# Altium schematic symbol library HMC784AMS8GE.SchLib: 1 symbol
Pins are listed as number, name and electrical type; pins without a type are passive.

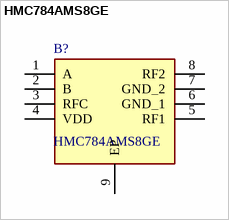
[diagram p0: symbol HMC784AMS8GE]

## HMC784AMS8GE
designator B?
RF Switch SPDT 0MHz to 4GHz 24dB Automotive 8-Pin MSOP EP T/R; Manufacturer_Name: Analog Devices; Geometry.Height: 1.1mm; Mouser Part Number: 584-HMC784AMS8GE; Mouser Price/Stock: https://www.mouser.co.uk/ProductDetail/Analog-Devices/HMC784AMS8GE?qs=AZz8fAaf6P%2Fj9bffWbFAng%3D%3D; Manufacturer_Part_Number: HMC784AMS8GE; Datasheet Link: https://www.analog.com/media/en/technical-documentation/data-sheets/hmc784a.pdf
footprint SOP65P488X110-9N
pins: 1 A, 2 B, 3 RFC, 4 VDD, 5 RF1, 6 GND_1, 7 GND_2, 8 RF2, 9 EP